# Altium schematic symbol library SM02B-GHS-TB(LF)(SN).SchLib: 1 symbol
Pins are listed as number, name and electrical type; pins without a type are passive.

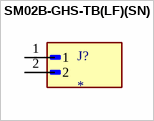
[diagram p0: symbol SM02B-GHS-TB(LF)(SN)]

## SM02B-GHS-TB(LF)(SN)
designator J?
Connector Header Surface Mount, Right Angle 2 position 0.049 (1.25mm); MF: JST Sales; MP: SM02B-GHS-TB(LF)(SN); SnapEDA_Link: https://www.snapeda.com/parts/SM02B-GHS-TB(LF)(SN)/JST/view-part/?ref=snap; Package: None; Value: *; Check_prices: https://www.snapeda.com/parts/SM02B-GHS-TB(LF)(SN)/JST/view-part/?ref=eda
footprint JST_SM02B-GHS-TB(LF)(SN)
pins: 1, 2